# Altium footprint library SamacSys.PcbLib: 1008 footprints (part 37 of 63)
Each footprint in its own frame and in the unit in brackets; x right, y up, seen from the top. Pads: shape width x height; smd on the part's side, far side on the other; paste and mask are expansions set on the pad; w line width, h text height; cw(c..) or ccw(c..) is an arc to the next point about the centre after c.
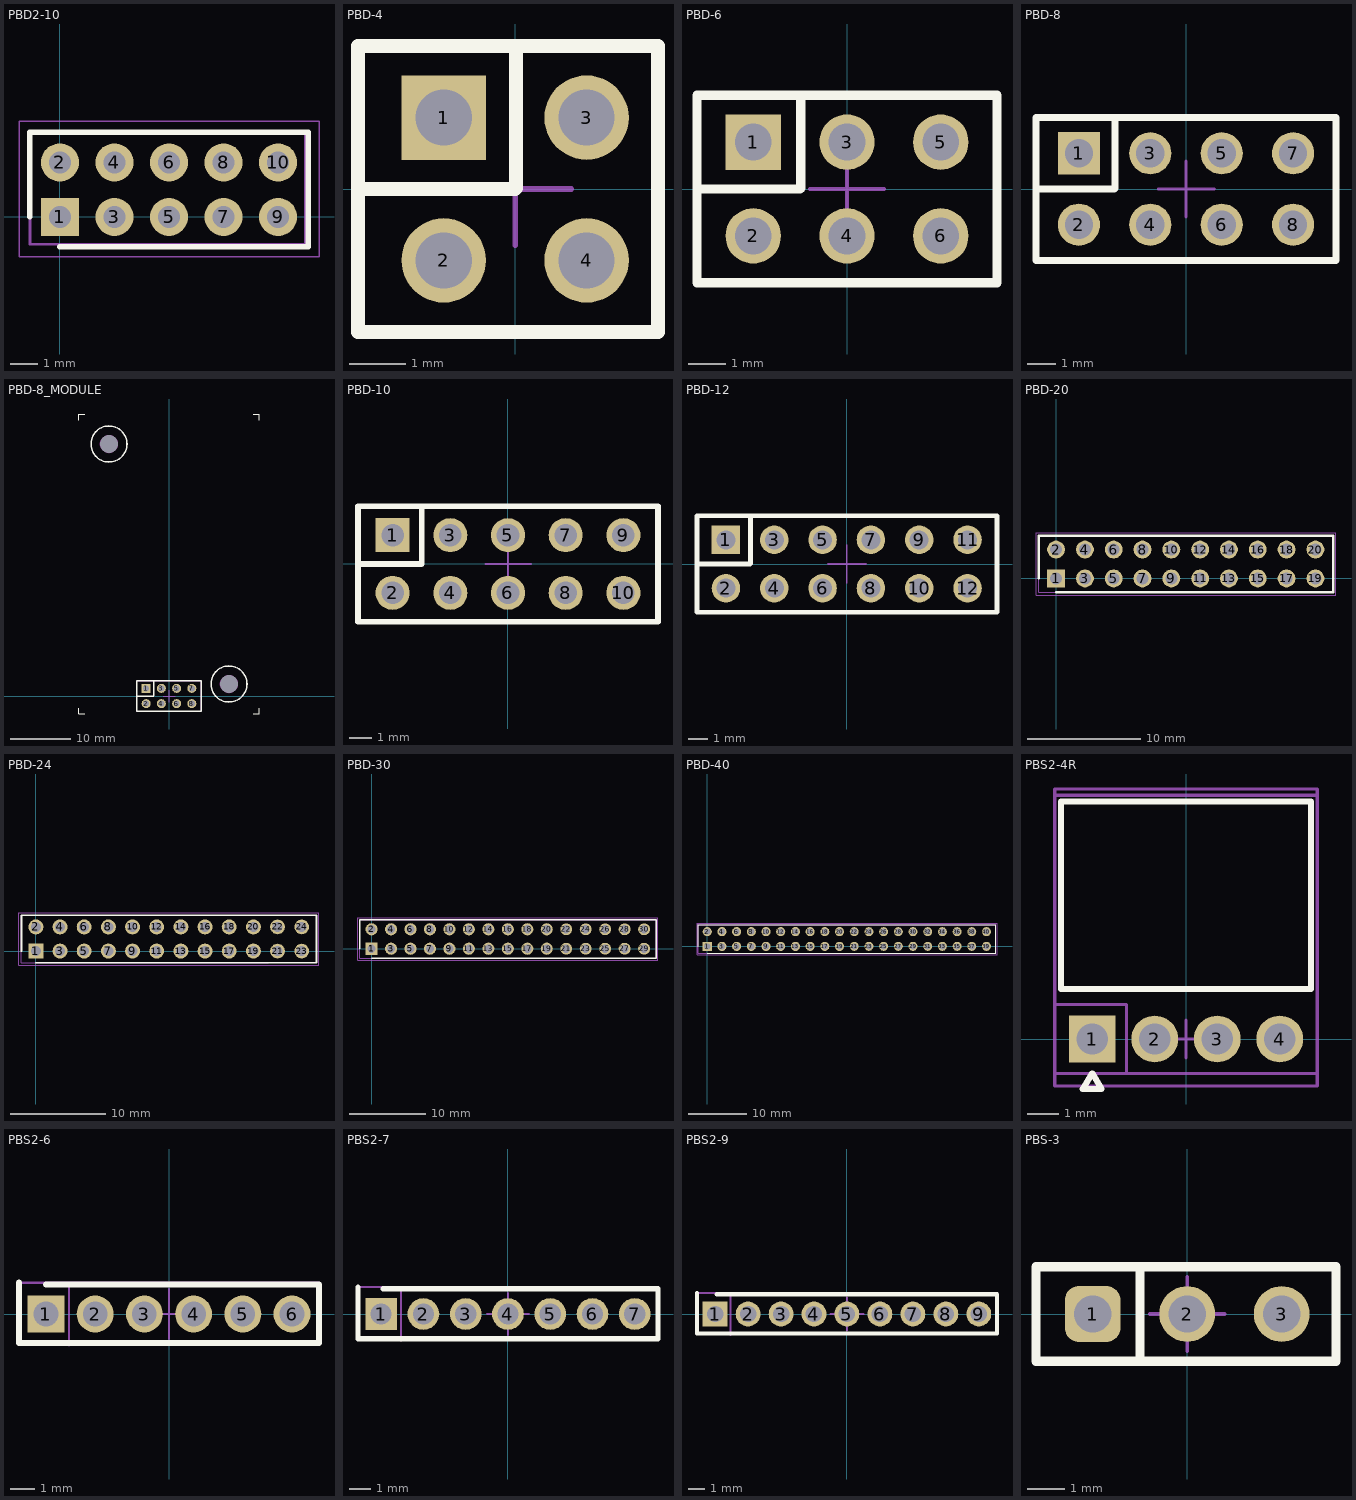
[diagram p36: the footprints below, top view; thin cyan lines are the x and y axes]

## PBD2-10 [mm]
pads (10):
  rect 1.4x1.4 hole 0.8: 1(0,0)
  round 1.4 hole 0.8: 2(0,2) 3(2,0) 4(2,2) 5(4,0) 6(4,2) 7(6,0) 8(6,2) 9(8,0) 10(8,2)
Top Overlay:
  lines w0.2: -1.1,0 -1.1,3.1 9.1,3.1 9.1,-1.1 0,-1.1
Assembly:
  lines w0.1: -1.1,-1 9,-1 9,3.1 -1.1,3.1 -1.1,-1
Countryard:
  lines w0.05: -1.5,-1.45 9.5,-1.45 9.5,3.5 -1.5,3.5 -1.5,-1.45
3D body "User Library-PBD2-10-1.step": height 4.3, standoff -2.7, extent -1,-1 9,3

## PBD-4 [mm]
height 10
pads (4):
  rect 1.5x1.5 hole 1: 1(-1.27,1.27)
  round 1.5 hole 1: 2(-1.27,-1.27) 3(1.27,1.27) 4(1.27,-1.27)
Top Overlay:
  lines w0.25: -2.794,0 0,0 ; 0.018,0.018 0.018,2.54 ; -2.794,-2.54 -2.794,2.54 2.54,2.54 2.54,-2.54 -2.794,-2.54
Assembly:
  lines w0.1: -2.794,-2.54 -2.794,2.54 2.54,2.54 2.54,-2.54 -2.54,-2.54
Countryard:
  lines w0.1: -2.794,-2.54 -2.794,2.54 2.54,2.54 2.54,-2.54 -2.54,-2.54 ; -1,0 1,0 ; 0,-1 0,1

## PBD-6 [mm]
height 10
pads (6):
  rect 1.5x1.5 hole 1: 1(-2.54,1.27)
  round 1.5 hole 1: 2(-2.54,-1.27) 3(0,1.27) 4(0,-1.27) 5(2.54,1.27) 6(2.54,-1.27)
Top Overlay:
  lines w0.25: -4.064,0 -1.27,0 ; -1.252,0.018 -1.252,2.54 ; -4.064,-2.54 -4.064,2.54 4.064,2.54 4.064,-2.54 -4.064,-2.54
Assembly:
  lines w0.1: -4.064,-2.54 -4.064,2.54 4.064,2.54 4.064,-2.54 ; -3.81,-2.54 3.81,-2.54
Countryard:
  lines w0.1: -4.064,-2.54 -4.064,2.54 4.064,2.54 4.064,-2.54 ; -3.81,-2.54 3.81,-2.54 ; -1,0 1,0 ; 0,-1 0,1
3D body "User Library-PBD_(DS1023-2)_2line_connectors_h=5_0_8_5mm_step_2_54mm.step": height 8.5, standoff -3, extent -4.06,-2.52 4.06,2.48

## PBD-8 [mm]
height 10
pads (8):
  rect 1.5x1.5 hole 1: 1(-3.81,1.27)
  round 1.5 hole 1: 2(-3.81,-1.27) 3(-1.27,1.27) 4(-1.27,-1.27) 5(1.27,1.27) 6(1.27,-1.27) 7(3.81,1.27) 8(3.81,-1.27)
Top Overlay:
  lines w0.25: -5.334,0 -2.54,0 ; -2.522,0.018 -2.522,2.54 ; -5.334,-2.54 5.334,-2.54 5.334,2.54 -5.334,2.54 -5.334,-2.54
Assembly:
  lines w0.1: -5.334,-2.54 -5.334,2.54 5.334,2.54 5.334,-2.54 -5.334,-2.54
Countryard:
  lines w0.1: -0.984,0 1.016,0 ; 0,-1 0,1 ; -5.334,-2.54 -5.334,2.54 5.334,2.54 5.334,-2.54 -5.334,-2.54
3D body "User Library-PBD_(DS1023-2)_2line_connectors_h=5_0_8_5mm_step_2_54mm.step": height 8.5, standoff -3, extent -5.33,-2.48 5.33,2.52

## PBD-8_MODULE [mm]
height 10
pads (10):
  rect 1.5x1.5 hole 1: 1(-3.81,1.27)
  round 1.5 hole 1: 2(-3.81,-1.27) 3(-1.27,1.27) 4(-1.27,-1.27) 5(1.27,1.27) 6(1.27,-1.27) 7(3.81,1.27) 8(3.81,-1.27)
  round 0 hole 3 unplated: ""(-10,42) ""(10,2)
Top Overlay:
  circle w0.254: c10,2 r3
  circle w0.254: c-10,42 r3
  lines w0.2: -15,-2 -15,-3 -14,-3 ; -15,46 -15,47 -14,47 ; 14,-3 15,-3 15,-2 ; 14,47 15,47 15,46
  lines w0.25: -5.334,0 -2.54,0 ; -2.522,0.018 -2.522,2.54 ; -5.334,-2.54 -5.334,2.54 5.334,2.54 5.334,-2.54 -5.334,-2.54
Keep-Out Layer:
  board cut-out: 10,0.5 9.852,0.5 9.562,0.558 9.289,0.671 9.044,0.835 8.835,1.044 8.671,1.289 8.558,1.562 8.5,1.852 8.5,2 8.5,2.148 8.558,2.438 8.671,2.711 8.835,2.956 9.044,3.165 9.289,3.329 9.562,3.442 9.852,3.5 10,3.5 10.148,3.5 10.438,3.442 10.71,3.329 10.956,3.165 11.165,2.956 11.329,2.711 11.442,2.438 11.5,2.148 11.5,2 11.5,1.852 11.442,1.562 11.329,1.289 11.165,1.044 10.956,0.835 10.711,0.671 10.438,0.558 10.148,0.5
  board cut-out: -10,40.5 -10.148,40.5 -10.438,40.558 -10.711,40.671 -10.956,40.835 -11.165,41.044 -11.329,41.289 -11.442,41.562 -11.5,41.852 -11.5,42 -11.5,42.148 -11.442,42.438 -11.329,42.71 -11.165,42.956 -10.956,43.165 -10.711,43.329 -10.438,43.442 -10.148,43.5 -10,43.5 -9.852,43.5 -9.562,43.442 -9.29,43.329 -9.044,43.165 -8.835,42.956 -8.671,42.711 -8.558,42.438 -8.5,42.148 -8.5,42 -8.5,41.852 -8.558,41.562 -8.671,41.289 -8.835,41.044 -9.044,40.835 -9.289,40.671 -9.562,40.558 -9.852,40.5
Assembly:
  lines w0.1: -5.334,-2.54 5.334,-2.54 5.334,2.54 -5.334,2.54 -5.334,-2.54
Countryard:
  lines w0.1: -0.984,0 1.016,0 ; 0,-1 0,1 ; -5.334,-2.54 5.334,-2.54 5.334,2.54 -5.334,2.54 -5.334,-2.54
Multi-Layer:
  pour cut-out: 10,-1 9.803,-1 9.413,-0.949 9.034,-0.847 8.67,-0.696 8.33,-0.5 8.018,-0.26 7.74,0.018 7.5,0.33 7.304,0.67 7.153,1.034 7.051,1.413 7,1.803 7,2 7,2.197 7.051,2.586 7.153,2.966 7.304,3.33 7.5,3.67 7.74,3.982 8.018,4.26 8.33,4.5 8.67,4.696 9.034,4.847 9.413,4.949 9.803,5 10,5 10.197,5 10.586,4.949 10.966,4.847 11.33,4.696 11.67,4.5 11.982,4.26 12.26,3.982 12.5,3.67 12.696,3.33 12.847,2.966 12.949,2.587 13,2.197 13,2 13,1.803 12.949,1.413 12.847,1.034 12.696,0.67 12.5,0.33 12.26,0.018 11.982,-0.26 11.67,-0.5 11.33,-0.696 10.966,-0.847 10.586,-0.949 10.197,-1
  pour cut-out: -10,39 -10.197,39 -10.587,39.051 -10.966,39.153 -11.33,39.304 -11.67,39.5 -11.982,39.74 -12.26,40.018 -12.5,40.33 -12.696,40.67 -12.847,41.034 -12.949,41.413 -13,41.803 -13,42 -13,42.197 -12.949,42.586 -12.847,42.966 -12.696,43.33 -12.5,43.67 -12.26,43.982 -11.982,44.26 -11.67,44.5 -11.33,44.696 -10.966,44.847 -10.587,44.949 -10.197,45 -10,45 -9.803,45 -9.414,44.949 -9.034,44.847 -8.67,44.696 -8.33,44.5 -8.018,44.26 -7.74,43.982 -7.5,43.67 -7.304,43.33 -7.153,42.966 -7.051,42.587 -7,42.197 -7,42 -7,41.803 -7.051,41.413 -7.153,41.034 -7.304,40.67 -7.5,40.33 -7.74,40.018 -8.018,39.74 -8.33,39.5 -8.67,39.304 -9.034,39.153 -9.413,39.051 -9.803,39
3D body "User Library-PBD_(DS1023-2)_2line_connectors_h=5_0_8_5mm_step_2_54mm.step": height 8.5, standoff -3, extent -5.33,-2.48 5.33,2.52

## PBD-10 [mm]
height 10
pads (10):
  rect 1.5x1.5 hole 1: 1(-5.08,1.27)
  round 1.5 hole 1: 2(-5.08,-1.27) 3(-2.54,1.27) 4(-2.54,-1.27) 5(0,1.27) 6(0,-1.27) 7(2.54,1.27) 8(2.54,-1.27) 9(5.08,1.27) 10(5.08,-1.27)
Top Overlay:
  lines w0.25: -6.604,0 -3.81,0 ; -3.792,0.018 -3.792,2.54 ; -6.604,-2.54 -6.604,2.54 6.604,2.54 6.604,-2.54 -6.604,-2.54
Assembly:
  lines w0.1: -6.604,-2.54 6.604,-2.54 6.604,2.54 -6.604,2.54 -6.604,-2.54
Countryard:
  lines w0.1: -0.984,0 1.016,0 ; 0,-1 0,1 ; -6.604,-2.54 6.604,-2.54 6.604,2.54 -6.604,2.54 -6.604,-2.54
3D body "User Library-PBD_(DS1023-2)_2line_connectors_h=5_0_8_5mm_step_2_54mm (1).step": height 8.5, standoff -3, extent -6.6,-2.46 6.6,2.54

## PBD-12 [mm]
height 10
pads (12):
  rect 1.5x1.5 hole 1: 1(-6.35,1.27)
  round 1.5 hole 1: 2(-6.35,-1.27) 3(-3.81,1.27) 4(-3.81,-1.27) 5(-1.27,1.27) 6(-1.27,-1.27) 7(1.27,1.27) 8(1.27,-1.27) 9(3.81,1.27) 10(3.81,-1.27) 11(6.35,1.27) 12(6.35,-1.27)
Top Overlay:
  lines w0.25: -7.874,0 -5.08,0 ; -5.062,0.018 -5.062,2.54 ; -7.874,-2.54 7.9,-2.54 7.9,2.54 -7.874,2.54 -7.874,-2.54
Assembly:
  lines w0.1: -7.874,-2.54 -7.874,2.54 7.9,2.54 7.9,-2.54 -7.874,-2.54
Countryard:
  lines w0.1: -0.984,0 1.016,0 ; 0,-1 0,1 ; -7.874,-2.54 -7.874,2.54 7.9,2.54 7.9,-2.54 -7.874,-2.54
3D body "User Library-PBD_(DS1023-2)_2line_connectors_h=5_0_8_5mm_step_2_54mm_fixed.step": height 8.5, standoff -3, extent -7.87,-2.54 7.87,2.46

## PBD-20 [mm]
pads (20):
  rect 1.575x1.575 hole 1.05: 1(0,0)
  round 1.575 hole 1.05: 2(0,2.54) 3(2.54,0) 4(2.54,2.54) 5(5.08,0) 6(5.08,2.54) 7(7.62,0) 8(7.62,2.54) 9(10.16,0) 10(10.16,2.54) 11(12.7,0) 12(12.7,2.54) 13(15.24,0) 14(15.24,2.54) 15(17.78,0) 16(17.78,2.54) 17(20.32,0) 18(20.32,2.54) 19(22.86,0) 20(22.86,2.54)
Top Overlay:
  lines w0.2: -1.52,0 -1.52,3.77 24.426,3.77 24.426,-1.23 0,-1.23
Assembly:
  lines w0.1: -1.52,-1.23 -1.52,3.77 24.426,3.77 24.426,-1.23 -1.52,-1.23
Countryard:
  lines w0.05: -1.77,-1.48 -1.77,4.02 24.676,4.02 24.676,-1.48 -1.77,-1.48
3D body "User Library-PBD_(DS1023-2)_2line_connectors_h=5_0_8_5mm_step_2_54mm (1).step": height 8.5, standoff -3, extent 11.15,-1.21 24.35,3.79
3D body "User Library-PBD_(DS1023-2)_2line_connectors_h=5_0_8_5mm_step_2_54mm (1).step": height 8.5, standoff -3, extent -1.6,-1.21 11.6,3.79

## PBD-24 [mm]
pads (24):
  rect 1.575x1.575 hole 1.05: 1(0,0)
  round 1.575 hole 1.05: 2(0,2.54) 3(2.54,0) 4(2.54,2.54) 5(5.08,0) 6(5.08,2.54) 7(7.62,0) 8(7.62,2.54) 9(10.16,0) 10(10.16,2.54) 11(12.7,0) 12(12.7,2.54) 13(15.24,0) 14(15.24,2.54) 15(17.78,0) 16(17.78,2.54) 17(20.32,0) 18(20.32,2.54) 19(22.86,0) 20(22.86,2.54)
  round 1.55 hole 1.05: 21(25.4,0) 22(25.4,2.54) 23(27.94,0) 24(27.94,2.54)
Top Overlay:
  lines w0.2: -1.52,0 -1.52,3.77 29.506,3.77 29.506,-1.23 0,-1.23
Assembly:
  lines w0.1: 24.426,-1.23 -1.52,-1.23 -1.52,3.77 29.506,3.77 29.506,-1.23
Countryard:
  lines w0.05: -1.77,-1.48 29.756,-1.48 29.756,4.02 -1.77,4.02 -1.77,-1.48
3D body "User Library-PBD_(DS1023-2)_2line_connectors_h=5_0_8_5mm_step_2_54mm (1).step": height 8.5, standoff -3, extent -1.6,-1.21 11.6,3.79
3D body "User Library-PBD_(DS1023-2)_2line_connectors_h=5_0_8_5mm_step_2_54mm (1).step": height 8.5, standoff -3, extent 11.15,-1.21 24.35,3.79
3D body "User Library-PBD_(DS1023-2)_2line_connectors_h=5_0_8_5mm_step_2_54mm (1).step": height 8.5, standoff -3, extent 16.26,-1.25 29.46,3.75

## PBD-30 [mm]
pads (30):
  rect 1.575x1.575 hole 1.05: 1(0,0)
  round 1.575 hole 1.05: 2(0,2.54) 3(2.54,0) 4(2.54,2.54) 5(5.08,0) 6(5.08,2.54) 7(7.62,0) 8(7.62,2.54) 9(10.16,0) 10(10.16,2.54) 11(12.7,0) 12(12.7,2.54) 13(15.24,0) 14(15.24,2.54) 15(17.78,0) 16(17.78,2.54) 17(20.32,0) 18(20.32,2.54) 19(22.86,0) 20(22.86,2.54)
  round 1.55 hole 1.05: 21(25.4,0) 22(25.4,2.54) 23(27.94,0) 24(27.94,2.54) 25(30.48,0) 26(30.48,2.54) 27(33.02,0) 28(33.02,2.54) 29(35.56,0) 30(35.56,2.54)
Top Overlay:
  lines w0.2: -1.52,0 -1.52,3.77 37.126,3.77 37.126,-1.23 0,-1.23
Assembly:
  lines w0.1: 24.426,-1.23 -1.52,-1.23 -1.52,3.77 37.126,3.77 37.126,-1.23
Countryard:
  lines w0.05: -1.77,-1.48 -1.77,4.02 37.376,4.02 37.376,-1.48 -1.77,-1.48
3D body "User Library-PBD_(DS1023-2)_2line_connectors_h=5_0_8_5mm_step_2_54mm (1).step": height 8.5, standoff -3, extent 23.85,-1.21 37.05,3.79
3D body "User Library-PBD_(DS1023-2)_2line_connectors_h=5_0_8_5mm_step_2_54mm (1).step": height 8.5, standoff -3, extent 11.15,-1.21 24.35,3.79
3D body "User Library-PBD_(DS1023-2)_2line_connectors_h=5_0_8_5mm_step_2_54mm (1).step": height 8.5, standoff -3, extent -1.6,-1.21 11.6,3.79

## PBD-40 [mm]
pads (40):
  rect 1.575x1.575 hole 1.05: 1(0,0)
  round 1.575 hole 1.05: 2(0,2.54) 3(2.54,0) 4(2.54,2.54) 5(5.08,0) 6(5.08,2.54) 7(7.62,0) 8(7.62,2.54) 9(10.16,0) 10(10.16,2.54) 11(12.7,0) 12(12.7,2.54) 13(15.24,0) 14(15.24,2.54) 15(17.78,0) 16(17.78,2.54) 17(20.32,0) 18(20.32,2.54) 19(22.86,0) 20(22.86,2.54)
  round 1.55 hole 1.05: 21(25.4,0) 22(25.4,2.54) 23(27.94,0) 24(27.94,2.54) 25(30.48,0) 26(30.48,2.54) 27(33.02,0) 28(33.02,2.54) 29(35.56,0) 30(35.56,2.54) 31(38.1,0) 32(38.1,2.54) 33(40.64,0) 34(40.64,2.54) 35(43.18,0) 36(43.18,2.54) 37(45.72,0) 38(45.72,2.54) 39(48.26,0) 40(48.26,2.54)
Top Overlay:
  lines w0.2: -1.52,0 -1.52,3.77 49.826,3.77 49.826,-1.23 0,-1.23
Assembly:
  lines w0.1: 24.426,-1.23 -1.52,-1.23 -1.52,3.77 49.826,3.77 49.826,-1.23
Countryard:
  lines w0.05: -1.77,-1.48 -1.77,4.02 50.076,4.02 50.076,-1.48 -1.77,-1.48
3D body "User Library-PBD_(DS1023-2)_2line_connectors_h=5_0_8_5mm_step_2_54mm (1).step": height 8.5, standoff -3, extent 36.55,-1.21 49.75,3.79
3D body "User Library-PBD_(DS1023-2)_2line_connectors_h=5_0_8_5mm_step_2_54mm (1).step": height 8.5, standoff -3, extent 23.85,-1.21 37.05,3.79
3D body "User Library-PBD_(DS1023-2)_2line_connectors_h=5_0_8_5mm_step_2_54mm (1).step": height 8.5, standoff -3, extent 11.15,-1.21 24.35,3.79
3D body "User Library-PBD_(DS1023-2)_2line_connectors_h=5_0_8_5mm_step_2_54mm (1).step": height 8.5, standoff -3, extent -1.6,-1.21 11.6,3.79

## PBS2-4R [mm]
height 4.3
pads (4):
  rect 1.5x1.5 hole 1: 1(-3,0)
  round 1.5 hole 1: 2(-1,0) 3(1,0) 4(3,0)
Top Overlay:
  lines w0.2: -4,1.6 -4,7.6 4,7.6 4,1.6 -4,1.6 ; -3.3,-1.6 -3,-1.1 -2.7,-1.6 -3.3,-1.6
Top Assembly:
  lines w0.1: -4.2,1.1 -1.9,1.1 -1.9,-1.1 ; -0.7,0 0.7,0 ; 0,-0.6 0,0.6 ; -4.2,-1.1 4.2,-1.1 4.2,7.8 -4.2,7.8 -4.2,-1.1
Top Courtyard:
  lines w0.1: -4.2,-1.3 -4.2,8 4.2,8 4.2,-1.5 -4.2,-1.5 -4.2,-1.2

## PBS2-6 [mm]
height 4.3
pads (6):
  rect 1.5x1.5 hole 1: 1(-5,0)
  round 1.5 hole 1: 2(-3,0) 3(-1,0) 4(1,0) 5(3,0) 6(5,0)
Top Overlay:
  lines w0.25: -6.096,1.27 -6.096,-1.175 6.096,-1.175 6.096,1.2 -5,1.2
Assembly:
  lines w0.1: -4.064,-1.27 -4.064,1.27 ; -6.096,-1.175 6.096,-1.175 6.096,1.27 -6.096,1.27 -6.096,-1.175
Countryard:
  lines w0.1: -1,0 1,0 ; 0,-1 0,1 ; -6.096,-1.175 6.096,-1.175 6.096,1.27 -6.096,1.27 -6.096,-1.175
3D body "PBS2-6.step": height 4.3, standoff -2.7, extent -5.975,-1.2 6.025,1.2

## PBS2-7 [mm]
height 4.3
pads (7):
  rect 1.5x1.5 hole 1: 1(-6,0)
  round 1.5 hole 1: 2(-4,0) 3(-2,0) 4(0,0) 5(2,0) 6(4,0) 7(6,0)
Top Overlay:
  lines w0.25: -7.096,1.27 -7.096,-1.175 7,-1.175 ; -5.9,1.2 7.1,1.2 7.1,-1.175
Assembly:
  lines w0.1: -5.064,-1.27 -5.064,1.27 ; -7.096,-1.175 7.1,-1.175 7.1,1.27 -7.096,1.27 -7.096,-1.175
Countryard:
  lines w0.1: -1,0 1,0 ; 0,-1 0,1 ; -7.096,-1.175 7.1,-1.175 7.1,1.27 -7.096,1.27 -7.096,-1.175
3D body "PBS2-7.step": height 4.3, standoff -2.7, extent -7,-1.2 7,1.2

## PBS2-9 [mm]
height 4.3
pads (9):
  rect 1.5x1.5 hole 1: 1(-8,0)
  round 1.5 hole 1: 2(-6,0) 3(-4,0) 4(-2,0) 5(0,0) 6(2,0) 7(4,0) 8(6,0) 9(8,0)
Top Overlay:
  lines w0.25: -9.096,1.27 -9.096,-1.175 9.1,-1.175 9.1,1.2 -7.9,1.2
Assembly:
  lines w0.1: -7.064,-1.27 -7.064,1.27 ; -9.096,-1.175 9.1,-1.175 9.1,1.27 -9.096,1.27 -9.096,-1.175
Countryard:
  lines w0.1: -1,0 1,0 ; 0,-1 0,1 ; -9.096,-1.175 9.1,-1.175 9.1,1.27 -9.096,1.27 -9.096,-1.175
3D body "User Library-PBS2-9.STEP": height 4.35, standoff -3.1, extent -9,-1 9,1

## PBS-3 [mm]
height 10
pads (3):
  rrect50% 1.5x1.5 hole 1: 1(-2.54,0)
  round 1.5 hole 1: 2(0,0) 3(2.54,0)
Top Overlay:
  lines w0.25: -1.27,-1.27 -1.27,1.27 ; -4.064,-1.27 4,-1.27 4,1.27 -4.064,1.27 -4.064,-1.27
Assembly:
  lines w0.1: -1.27,-1.27 -1.27,1.27 ; -4.064,-1.27 4,-1.27 4,1.27 -4.064,1.27 -4.064,-1.27
Countryard:
  lines w0.1: -1,0 1,0 ; 0,-1 0,1 ; -4.064,-1.27 4,-1.27 4,1.27 -4.064,1.27 -4.064,-1.27
3D body "User Library-PBS_(DS1023)_1line_connectors_h=5_0_8_5mm_step_2_54mm.step": height 8.5, standoff -3, extent -4.06,-1.23 4.06,1.27